# Altium footprint library custom-case.PcbLib: 483 footprints (part 11 of 31)
Each footprint in its own frame and in the unit in brackets; x right, y up, seen from the top. Pads: shape width x height; smd on the part's side, far side on the other; paste and mask are expansions set on the pad; w line width, h text height; cw(c..) or ccw(c..) is an arc to the next point about the centre after c.
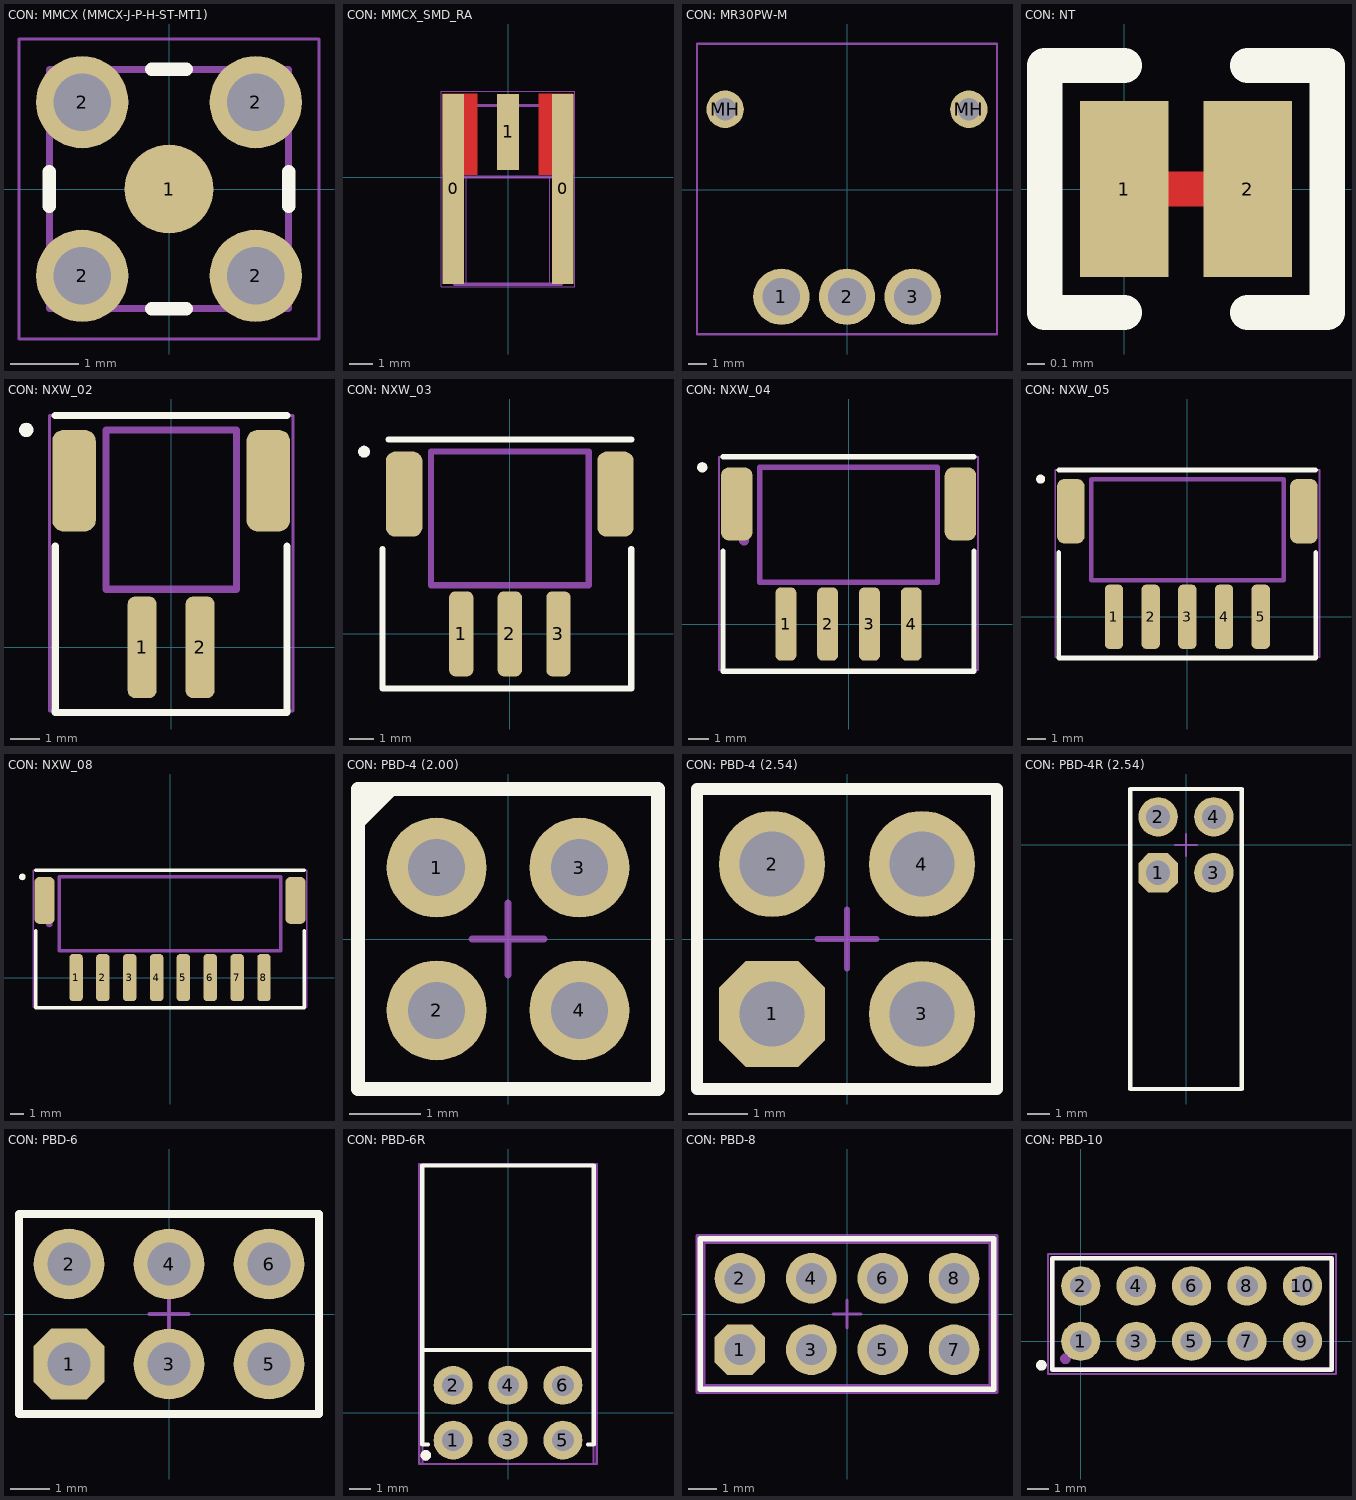
[diagram p10: the footprints below, top view; thin cyan lines are the x and y axes]

## CON: MMCX (MMCX-J-P-H-ST-MT1) [mm]
pads (5):
  round 1.3 smd: 1(0,0)
  round 1.348 hole 0.84: 2(-1.27,-1.27) 2(-1.27,1.27) 2(1.27,-1.27) 2(1.27,1.27)
Top Overlay:
  lines w0.2: -1.75,-0.25 -1.75,0.25 ; -0.25,-1.75 0.25,-1.75 ; -0.25,1.75 0.25,1.75 ; 1.75,-0.25 1.75,0.25
3D model:
  lines w0.1: -1.75,-1.75 1.75,-1.75 1.75,1.75 -1.75,1.75 -1.75,-1.75
Size Area:
  lines w0.05: -2.195,-2.195 -2.195,2.195 2.195,2.195 2.195,-2.195 -2.195,-2.195
  lines w0.1: -0.5,0 0.5,0 ; 0,-0.5 0,0.5
3D body "MMCX-J-P-H-ST-MT1.STEP": height 5.06, standoff -2.34, extent -1.75,-1.75 1.75,1.75

## CON: MMCX_SMD_RA [mm]
height 10
pads (3):
  rect 0.9x8 smd: 0(-2.3,-0.5) 0(2.3,-0.5)
  rect 0.94x3.2 smd: 1(0,1.9)
Top Layer:
  region: -1.3,0.1 -1.3,3.5 -2.75,3.5 -2.75,0.1
  region: 1.3,0.1 1.3,3.5 2.75,3.5 2.75,0.1
Top Assy:
  lines w0: -2.3,-4.5 -1.75,-4.5 -1.75,0 1.75,0 1.75,-4.5 2.3,-4.5
3D model:
  lines w0.127: -2.25,0 -2.25,-4.5 2.25,-4.5 2.25,0 ; -2.25,0 -2.25,3 2.25,3 2.25,0 ; -2.25,0 2.25,0
Size Area:
  lines w0.05: -2.8,-4.6 -2.8,3.6 2.8,3.6 2.8,-4.6 -2.8,-4.6
3D body "step_temp.STEP": height 2.12, standoff -1.39, extent -2.235,-4.5 2.235,3

## CON: MR30PW-M [mm]
pads (5):
  round 3 hole 2: 1(-3.5,-5.7) 2(0,-5.7) 3(3.5,-5.7)
  round 2 hole 1.2: MH(-6.5,4.3) MH(6.5,4.3)
Size Area:
  lines w0.1: -0.5,-5.7 0.5,-5.7 ; 0,-6.2 0,-5.2
  lines w0.127: -8,-7.7 8,-7.7 8,7.8 -8,7.8 -8,-7.7
3D body "MR30PW.step": height 5.65, standoff -1.05, extent -7.15,-6.976 7.15,7.7

## CON: NT [mm] "Net Tie 1"
pads (2):
  rect 0.5x1 smd: 1(0,0) 2(0.7,0)
Top Layer:
  rectangle: 0.225,-0.1 0.475,0.1
  rectangle: 0.225,-0.1 0.475,0
Top Overlay:
  lines w0.2: 0,-0.7 -0.45,-0.7 -0.45,0.7 0,0.7 ; 0.7,-0.7 1.15,-0.7 1.15,0.7 0.7,0.7

## CON: NXW_02 [mm]
pads (5):
  rrect50% 1x3.5 smd: 1(-1,0) 2(1,0)
  round 0.5 on Top Overlay: ""(-5,7.5)
  rrect50% 1.5x3.5 smd: ""(-3.35,5.75) ""(3.35,5.75)
Top Overlay:
  lines w0.25: -4,3.5 -4,-2.25 4,-2.25 4,3.5 ; -4,8 4,8
Top Assy:
  lines w0.25: -2.25,2 2.25,2 2.25,7.5 -2.25,7.5 -2.25,5.375 -2.25,2
  text "1" at -1.2,2.7 h2
  text "2" at 0.7,2.7 h2
Size Area:
  lines w0.1: -4.2,-2.2 -4.2,8 4.2,8 4.2,-2.2 -4.2,-2.2
3D body "NXG_2.STEP": height 5.61, standoff 0.01, extent -3.98,-1.2 3.98,7.7

## CON: NXW_03 [mm]
pads (6):
  rrect50% 1x3.5 smd: 1(-2,0) 2(0,0) 3(2,0)
  round 0.5 on Top Overlay: ""(-6,7.5)
  rrect50% 1.5x3.5 smd: ""(-4.35,5.75) ""(4.35,5.75)
Top Overlay:
  lines w0.25: -5.25,3.5 -5.25,-2.25 3,-2.25 5,-2.25 5,1.25 5,3.5 ; -5,8 5,8
Top Assy:
  lines w0.25: -3.25,2 -3.25,7.5 3.25,7.5 3.25,5.375 3.25,2 -3.25,2
  text "1" at -2.2,2.7 h2
  text "2" at -0.3,2.7 h2
  text "3" at 1.7,2.7 h2
3D body "NXG_3.STEP": height 5.61, standoff 0.01, extent -4.96,-1.2 5,7.7

## CON: NXW_04 [mm]
pads (8):
  rrect50% 1x3.5 smd: 1(-3,0) 2(-1,0) 3(1,0) 4(3,0)
  round 0.5 on Top Overlay: ""(-7,7.5)
  rrect50% 1.5x3.5 smd: ""(-5.35,5.75) ""(5.35,5.75)
  round 0.5 on Mech1: ""(-5,4)
Top Overlay:
  lines w0.25: -6,3.5 -6,-2.25 4,-2.25 6,-2.25 6,1.25 6,3.5 ; -6,8 6,8
Top Assy:
  lines w0.25: -4.25,2 4.25,2 4.25,5.375 4.25,7.5 -4.25,7.5 -4.25,2
  text "4" at 2.7,2.7 h2
  text "3" at 0.7,2.7 h2
  text "2" at -1.3,2.7 h2
  text "1" at -3.2,2.7 h2
Size Area:
  lines w0.1: -6.2,-2.2 6.2,-2.2 6.2,8 -6.2,8 -6.2,-2.2
3D body "NXG_4.STEP": height 5.61, standoff 0.01, extent -6,-1 6,7.9

## CON: NXW_05 [mm]
pads (8):
  rrect50% 1x3.5 smd: 1(-4,0) 2(-2,0) 3(0,0) 4(2,0) 5(4,0)
  round 0.5 on Top Overlay: ""(-8,7.5)
  rrect50% 1.5x3.5 smd: ""(-6.35,5.75) ""(6.35,5.75)
Top Overlay:
  lines w0.25: -7,3.5 -7,1.25 -7,-2.25 -5,-2.25 7,-2.25 7,3.5 ; -7,8 7,8
Top Assy:
  lines w0.25: -5.25,2 5.25,2 5.25,7.5 -5.25,7.5 -5.25,5.375 -5.25,2
  text "5" at 3.7,2.7 h2
  text "1" at -4.2,2.7 h2
  text "2" at -2.3,2.7 h2
  text "3" at -0.3,2.7 h2
  text "4" at 1.7,2.7 h2
Size Area:
  lines w0.1: -7.2,-2.2 -7.2,8 7.2,8 7.2,-2.2 -7.2,-2.2
3D body "NXG_5.STEP": height 5.61, standoff 0.01, extent -7,-1.2 7,7.7

## CON: NXW_08 [mm]
pads (12):
  rrect50% 1x3.5 smd: 1(-7,0) 2(-5,0) 3(-3,0) 4(-1,0) 5(1,0) 6(3,0) 7(5,0) 8(7,0)
  round 0.5 on Top Overlay: ""(-11,7.5)
  rrect50% 1.5x3.5 smd: ""(-9.35,5.75) ""(9.35,5.75)
  round 0.5 on Mech1: ""(-9,4)
Top Overlay:
  lines w0.25: -10,3.5 -10,-2.25 0,-2.25 10,-2.25 10,3.5 ; -10,8 10,8
Top Assy:
  lines w0.25: -8.25,2 -8.25,7.5 8.25,7.5 8.25,5.375 8.25,2 -8.25,2
  text "1" at -7.2,2.7 h2
  text "2" at -5.3,2.7 h2
  text "3" at -3.3,2.7 h2
  text "4" at -1.3,2.7 h2
  text "5" at 0.7,2.7 h2
  text "6" at 2.7,2.7 h2
  text "7" at 4.7,2.7 h2
  text "8" at 6.7,2.7 h2
Size Area:
  lines w0.1: -10.2,-2.2 -10.2,8 10.2,8 10.2,-2.2 -10.2,-2.2
3D body "NXW_08.STEP": height 5.61, standoff 0.01, extent -10,-1.2 10,7.7

## CON: PBD-4 (2.00) [mm] "PBD-4"
height 10
pads (4):
  round 1.4 hole 0.8: 1(-1,1) 2(-1,-1) 3(1,1) 4(1,-1)
Top Overlay:
  region: -2.1,1.5 -1.5,2.1 -2.1,2.1
  lines w0.2: -2.1,-2.1 2.1,-2.1 2.1,2.1 -2.1,2.1 -2.1,-2.1
Top Assy:
  lines w0.1: -2.1,-2.1 2.1,-2.1 2.1,2.1 -2.1,2.1 -2.1,-2.1
Size Area:
  lines w0.1: -0.5,0 0.5,0 ; 0,-0.5 0,0.5 ; -2.1,-2.1 2.1,-2.1 2.1,2.1 -2.1,2.1 -2.1,-2.1
3D body "791077001-1.STEP": height 4.22, standoff -3.22, extent -2.095,-2.095 2.095,2.095

## CON: PBD-4 (2.54) [mm] "PBD-4"
height 10
pads (4):
  oct 1.8x1.8 hole 1.1: 1(-1.27,-1.27)
  round 1.8 hole 1.1: 2(-1.27,1.27) 3(1.27,-1.27) 4(1.27,1.27)
Top Overlay:
  lines w0.2: -2.54,-2.54 2.54,-2.54 2.54,2.54 -2.54,2.54 -2.54,-2.54
Top Assy:
  lines w0.1: -2.54,-2.54 2.54,-2.54 2.54,2.54 -2.54,2.54 -2.54,-2.54
Size Area:
  lines w0.1: -0.5,0 0.5,0 ; 0,-0.5 0,0.5 ; -2.54,-2.54 2.54,-2.54 2.54,2.54 -2.54,2.54 -2.54,-2.54
3D body "User Library-PBD-4R.STEP": height 8.53, standoff -0.57, extent -2.54,-2.54 2.54,2.54

## CON: PBD-4R (2.54) [mm] "PBD-4"
height 10
pads (4):
  oct 1.8x1.8 hole 1.1: 1(-1.27,-1.27)
  round 1.8 hole 1.1: 2(-1.27,1.27) 3(1.27,-1.27) 4(1.27,1.27)
Top Overlay:
  lines w0.2: -2.54,-11.1 -2.54,2.54 2.54,2.54 2.54,-11.1 -2.54,-11.1
Top Assy:
  lines w0.1: -2.54,-11.1 -2.54,2.54 2.54,2.54 2.54,-11.1 -2.54,-11.1
Size Area:
  lines w0.1: -0.5,0 0.5,0 ; 0,-0.5 0,0.5 ; -2.54,-11.1 -2.54,2.54 2.54,2.54 2.54,-11.1 -2.54,-11.1
3D body "User Library-PBD-4R.STEP": height 5.08, standoff -3.5, extent -2.54,-11.102 2.54,1.502

## CON: PBD-6 [mm] "PBD-6"
height 10
pads (6):
  oct 1.8x1.8 hole 1.1: 1(-2.54,-1.27)
  round 1.8 hole 1.1: 2(-2.54,1.27) 3(0,-1.27) 4(0,1.27) 5(2.54,-1.27) 6(2.54,1.27)
Top Overlay:
  lines w0.2: -3.81,-2.54 3.81,-2.54 3.81,2.54 -3.81,2.54 -3.81,-2.54
Top Assy:
  lines w0.1: -3.81,-2.54 3.81,-2.54 3.81,2.54 -3.81,2.54 -3.81,-2.54
Size Area:
  lines w0.1: -0.5,0 0.5,0 ; 0,-0.5 0,0.5 ; -3.81,-2.54 -3.81,2.54 3.81,2.54 3.81,-2.54 -3.81,-2.54
3D body "PBD-6.STEP": height 8.5, standoff -3, extent -3.81,-2.54 3.81,2.54

## CON: PBD-6R [mm]
pads (8):
  round 1.8 hole 1: 1(-2.54,-1.27) 2(-2.54,1.27) 3(0,-1.27) 4(0,1.27) 5(2.54,-1.27) 6(2.54,1.27)
  round 0.5 on Mech1: ""(-3.8,-1.97)
  round 0.5 on Top Overlay: ""(-3.8,-1.97)
Top Overlay:
  lines w0.2: -3.96,2.9 3.96,2.9 ; -3.7,-1.47 -3.96,-1.47 -3.96,11.43 3.96,11.43 3.96,-1.47 3.7,-1.47
Top Assy:
  lines w0.1: -3.96,-2.37 3.96,-2.37 3.96,11.43 -3.96,11.43 -3.96,-2.37
Size Area:
  lines w0.1: -4.1,-2.37 4.1,-2.37 4.1,11.5 -4.1,11.5 -4.1,-2.37
3D body "PLD-2x3.STEP": height 5.02, standoff -3.48, extent -3.96,-1.47 3.96,11.43

## CON: PBD-8 [mm] "PBD-8"
height 10
pads (8):
  oct 1.8x1.8 hole 1.1: 1(-3.81,-1.27)
  round 1.8 hole 1.1: 2(-3.81,1.27) 3(-1.27,-1.27) 4(-1.27,1.27) 5(1.27,-1.27) 6(1.27,1.27) 7(3.81,-1.27) 8(3.81,1.27)
Top Overlay:
  lines w0.2: -5.225,-2.675 5.225,-2.675 5.225,2.675 -5.225,2.675 -5.225,-2.675
Top Assy:
  lines w0.1: -5.08,-2.54 5.08,-2.54 5.08,2.54 -5.08,2.54 -5.08,-2.54
Size Area:
  lines w0.1: -0.5,0 0.5,0 ; 0,-0.5 0,0.5 ; -5.334,-2.794 -5.334,2.794 5.334,2.794 5.334,-2.794 -5.334,-2.794
3D body "PBD-8.STEP": height 8.5, standoff -3, extent -5.08,-2.54 5.08,2.54

## CON: PBD-10 [mm]
pads (12):
  round 1.8 hole 1: 1(0,0) 2(0,2.54) 3(2.54,0) 4(2.54,2.54) 5(5.08,0) 6(5.08,2.54) 7(7.62,0) 8(7.62,2.54) 9(10.16,0) 10(10.16,2.54)
  round 0.5 on Top Overlay: ""(-1.8,-1.1)
  round 0.5 on Mech1: ""(-0.7,-0.8)
Top Overlay:
  lines w0.2: -1.3,-1.3 -1.3,3.8 11.5,3.8 11.5,-1.3 -1.3,-1.3
Top Assy:
  lines w0.1: -1.25,-1.24 11.45,-1.24 11.45,3.84 -1.25,3.84 -1.25,-1.24
Size Area:
  lines w0.1: -1.5,-1.5 -1.5,4 11.7,4 11.7,-1.5 -1.5,-1.5
3D body "User Library-PBD2_54-10.STEP": height 8.4, standoff -2.7, extent -1.25,-1.24 11.45,3.84